# Altium footprint library HSR_BM28B06.PcbLib: 8 footprints
Each footprint in its own frame and in the unit in brackets; x right, y up, seen from the top. Pads: shape width x height; smd on the part's side, far side on the other; paste and mask are expansions set on the pad; w line width, h text height; cw(c..) or ccw(c..) is an arc to the next point about the centre after c.
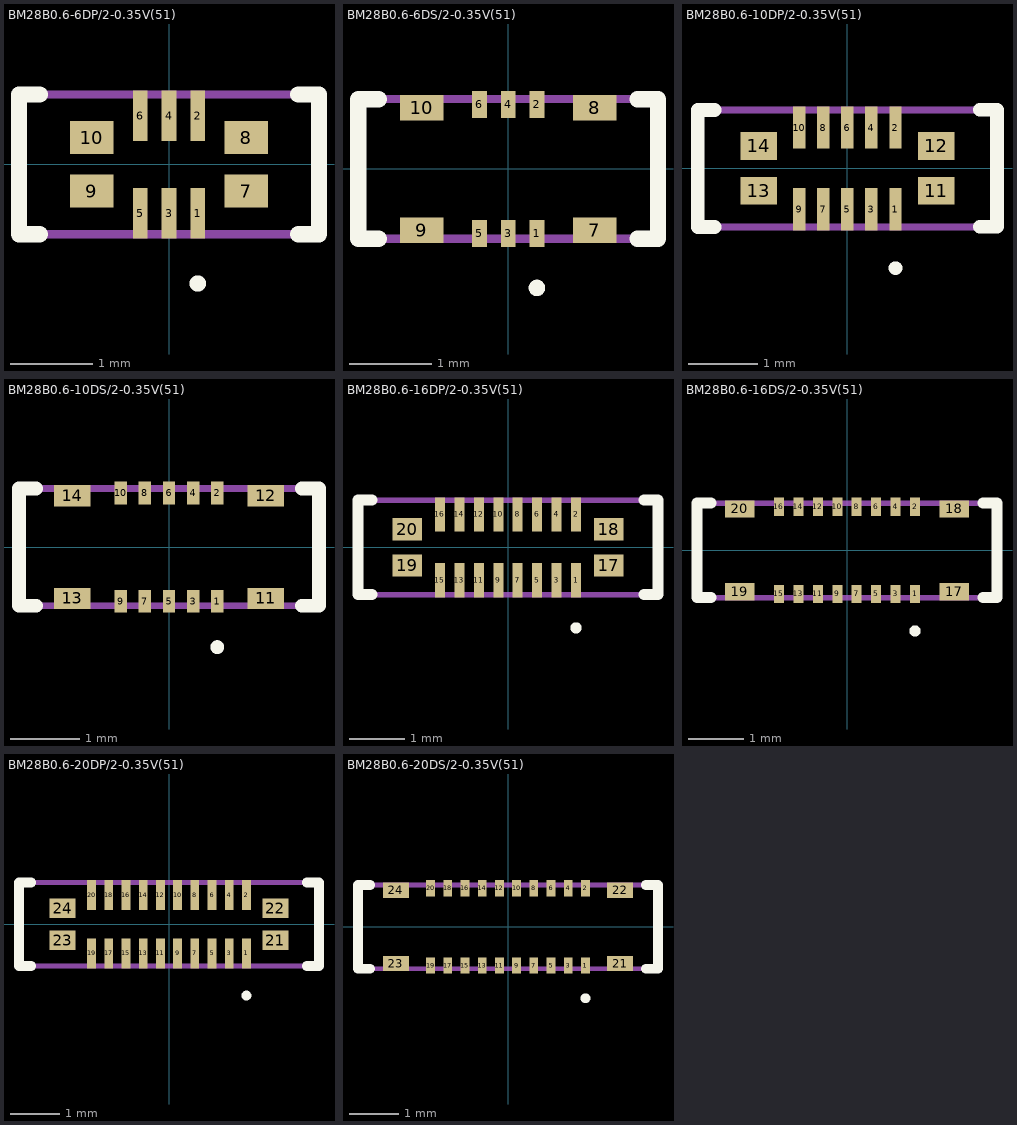
[diagram p0: the footprints below, top view; thin cyan lines are the x and y axes]

## BM28B0.6-6DP/2-0.35V(51) [mm] "BM28B0.6-6DP/2-0.35V(51)"
pads (10):
  rect 0.18x0.615 smd: 1(0.35,-0.593) 2(0.35,0.593) 3(0,-0.593) 4(0,0.593) 5(-0.35,-0.593) 6(-0.35,0.593)
  rect 0.53x0.4 smd: 7(0.94,-0.325) 8(0.94,0.325) 9(-0.94,-0.325) 10(-0.94,0.325)
Top Overlay:
  lines w0.1: 0.35,-1.5 ccw(c0.35,-1.45) 0.35,-1.4 ; 0.35,-1.5 cw(c0.35,-1.45) 0.35,-1.4 ; 0.35,-1.5 ccw(c0.35,-1.45) 0.35,-1.4
  lines w0.2: -1.575,-0.85 -1.825,-0.85 -1.825,0.85 -1.575,0.85 ; 1.575,-0.85 1.825,-0.85 1.825,0.85 1.575,0.85
Top Designator:
  text ".Designator" at -5.998,-0.4 h1.2
Mechanical 15:
  lines w0.1: -1.825,-0.85 -1.825,0.85 1.825,0.85 1.825,-0.85 -1.825,-0.85
3D body "BM28-6DP.stp": height 0.48, standoff 0.01, extent -1.485,-0.75 1.485,0.75

## BM28B0.6-6DS/2-0.35V(51) [mm] "BM28B0.6-6DS/2-0.35V(51)"
pads (10):
  rect 0.18x0.33 smd: 1(0.35,-0.785) 2(0.35,0.785) 3(0,-0.785) 4(0,0.785) 5(-0.35,-0.785) 6(-0.35,0.785)
  rect 0.53x0.31 smd: 7(1.055,-0.745) 8(1.055,0.745) 9(-1.055,-0.745) 10(-1.055,0.745)
Top Overlay:
  lines w0.1: 0.35,-1.5 ccw(c0.35,-1.45) 0.35,-1.4 ; 0.35,-1.5 cw(c0.35,-1.45) 0.35,-1.4 ; 0.35,-1.5 ccw(c0.35,-1.45) 0.35,-1.4
  lines w0.2: -1.575,-0.85 -1.825,-0.85 -1.825,0.85 -1.575,0.85 ; 1.575,-0.85 1.825,-0.85 1.825,0.85 1.575,0.85
Top Designator:
  text ".Designator" at -5.998,-0.4 h1.2
Mechanical 15:
  lines w0.1: -1.829,-0.85 -1.829,0.85 1.825,0.85 1.825,-0.85 -1.829,-0.85
3D body "BM28-6DS.stp": height 0.61, standoff 0.01, extent -1.825,-0.85 1.825,0.85

## BM28B0.6-10DP/2-0.35V(51) [mm] "BM28B0.6-10DP/2-0.35V(51)"
pads (14):
  rect 0.18x0.615 smd: 1(0.7,-0.593) 2(0.7,0.593) 3(0.35,-0.593) 4(0.35,0.593) 5(0,-0.593) 6(0,0.593) 7(-0.35,-0.593) 8(-0.35,0.593) 9(-0.7,-0.593) 10(-0.7,0.593)
  rect 0.53x0.4 smd: 11(1.29,-0.325) 12(1.29,0.325) 13(-1.29,-0.325) 14(-1.29,0.325)
Top Overlay:
  lines w0.1: 0.7,-1.5 ccw(c0.7,-1.45) 0.7,-1.4 ; 0.7,-1.5 cw(c0.7,-1.45) 0.7,-1.4 ; 0.7,-1.5 ccw(c0.7,-1.45) 0.7,-1.4
  lines w0.2: -1.925,-0.85 -2.175,-0.85 -2.175,0.85 -1.925,0.85 ; 1.925,-0.85 2.175,-0.85 2.175,0.85 1.925,0.85
Top Designator:
  text ".Designator" at -5.998,-0.4 h1.2
Mechanical 15:
  lines w0.1: -2.184,-0.85 -2.184,0.85 2.175,0.85 2.175,-0.85 -2.184,-0.85
3D body "BM28-10DP.stp": height 0.46, standoff -0.01, extent -1.835,-0.75 1.835,0.75

## BM28B0.6-10DS/2-0.35V(51) [mm] "BM28B0.6-10DS/2-0.35V(51)"
pads (14):
  rect 0.18x0.33 smd: 1(0.7,-0.785) 2(0.7,0.785) 3(0.35,-0.785) 4(0.35,0.785) 5(0,-0.785) 6(0,0.785) 7(-0.35,-0.785) 8(-0.35,0.785) 9(-0.7,-0.785) 10(-0.7,0.785)
  rect 0.53x0.31 smd: 11(1.405,-0.745) 12(1.405,0.745) 13(-1.405,-0.745) 14(-1.405,0.745)
Top Overlay:
  lines w0.1: 0.7,-1.5 ccw(c0.7,-1.45) 0.7,-1.4 ; 0.7,-1.5 cw(c0.7,-1.45) 0.7,-1.4 ; 0.7,-1.5 ccw(c0.7,-1.45) 0.7,-1.4
  lines w0.2: -1.925,-0.85 -2.175,-0.85 -2.175,0.85 -1.925,0.85 ; 1.925,-0.85 2.175,-0.85 2.175,0.85 1.925,0.85
Top Designator:
  text ".Designator" at -5.998,-0.4 h1.2
Mechanical 15:
  lines w0.1: -2.175,-0.85 2.175,-0.85 2.175,0.85 -2.175,0.85 -2.175,-0.85
3D body "BM28-10DS.stp": height 0.59, standoff -0.01, extent -2.181,-0.844 2.169,0.856

## BM28B0.6-16DP/2-0.35V(51) [mm] "BM28B0.6-16DP/2-0.35V(51)"
pads (20):
  rect 0.18x0.615 smd: 1(1.225,-0.593) 2(1.225,0.593) 3(0.875,-0.593) 4(0.875,0.593) 5(0.525,-0.593) 6(0.525,0.593) 7(0.175,-0.593) 8(0.175,0.593) 9(-0.175,-0.593) 10(-0.175,0.593) 11(-0.525,-0.593) 12(-0.525,0.593) 13(-0.875,-0.593) 14(-0.875,0.593) 15(-1.225,-0.593) 16(-1.225,0.593)
  rect 0.53x0.4 smd: 17(1.815,-0.325) 18(1.815,0.325) 19(-1.815,-0.325) 20(-1.815,0.325)
Top Overlay:
  lines w0.1: 1.225,-1.5 ccw(c1.225,-1.45) 1.225,-1.4 ; 1.225,-1.5 cw(c1.225,-1.45) 1.225,-1.4 ; 1.225,-1.5 ccw(c1.225,-1.45) 1.225,-1.4
  lines w0.2: -2.45,-0.85 -2.7,-0.85 -2.7,0.85 -2.45,0.85 ; 2.45,-0.85 2.7,-0.85 2.7,0.85 2.45,0.85
Top Designator:
  text ".Designator" at -5.998,-0.4 h1.2
Mechanical 15:
  lines w0.1: -2.7,-0.85 2.7,-0.85 2.7,0.85 -2.7,0.85 -2.7,-0.85
3D body "BM28-16DP.stp": height 0.48, standoff 0.01, extent -2.36,-0.75 2.36,0.75

## BM28B0.6-16DS/2-0.35V(51) [mm] "BM28B0.6-16DS/2-0.35V(51)"
pads (20):
  rect 0.18x0.33 smd: 1(1.225,-0.785) 2(1.225,0.785) 3(0.875,-0.785) 4(0.875,0.785) 5(0.525,-0.785) 6(0.525,0.785) 7(0.175,-0.785) 8(0.175,0.785) 9(-0.175,-0.785) 10(-0.175,0.785) 11(-0.525,-0.785) 12(-0.525,0.785) 13(-0.875,-0.785) 14(-0.875,0.785) 15(-1.225,-0.785) 16(-1.225,0.785)
  rect 0.53x0.31 smd: 17(1.93,-0.745) 18(1.93,0.745) 19(-1.93,-0.745) 20(-1.93,0.745)
Top Overlay:
  lines w0.1: 1.225,-1.5 ccw(c1.225,-1.45) 1.225,-1.4 ; 1.225,-1.5 cw(c1.225,-1.45) 1.225,-1.4 ; 1.225,-1.5 ccw(c1.225,-1.45) 1.225,-1.4
  lines w0.2: -2.45,-0.85 -2.7,-0.85 -2.7,0.85 -2.45,0.85 ; 2.45,-0.85 2.7,-0.85 2.7,0.85 2.45,0.85
Top Designator:
  text ".Designator" at -5.998,-0.4 h1.2
Mechanical 15:
  lines w0.1: -2.692,-0.85 2.7,-0.85 2.7,0.85 -2.692,0.85 -2.692,-0.85
3D body "BM28-16DS.stp": height 0.6, standoff 0, extent -2.7,-0.85 2.7,0.85

## BM28B0.6-20DP/2-0.35V(51) [mm] "BM28B0.6-20DP/2-0.35V(51)"
pads (24):
  rect 0.18x0.615 smd: 1(1.575,-0.593) 2(1.575,0.593) 3(1.225,-0.593) 4(1.225,0.593) 5(0.875,-0.593) 6(0.875,0.593) 7(0.525,-0.593) 8(0.525,0.593) 9(0.175,-0.593) 10(0.175,0.593) 11(-0.175,-0.593) 12(-0.175,0.593) 13(-0.525,-0.593) 14(-0.525,0.593) 15(-0.875,-0.593) 16(-0.875,0.593) 17(-1.225,-0.593) 18(-1.225,0.593) 19(-1.575,-0.593) 20(-1.575,0.593)
  rect 0.53x0.4 smd: 21(2.165,-0.325) 22(2.165,0.325) 23(-2.165,-0.325) 24(-2.165,0.325)
Top Overlay:
  lines w0.1: 1.575,-1.5 ccw(c1.575,-1.45) 1.575,-1.4 ; 1.575,-1.5 cw(c1.575,-1.45) 1.575,-1.4 ; 1.575,-1.5 ccw(c1.575,-1.45) 1.575,-1.4
  lines w0.2: -2.8,-0.85 -3.05,-0.85 -3.05,0.85 -2.8,0.85 ; 2.8,-0.85 3.05,-0.85 3.05,0.85 2.8,0.85
Top Designator:
  text ".Designator" at -5.998,-0.4 h1.2
Mechanical 15:
  lines w0.1: -3.05,-0.85 -3.05,0.85 3.05,0.85 3.05,-0.85 -3.05,-0.85
3D body "BM28-20DP.stp": height 0.48, standoff 0.01, extent -2.71,-0.75 2.71,0.75

## BM28B0.6-20DS/2-0.35V(51) [mm] "BM28B0.6-20DS/2-0.35V(51)"
pads (24):
  rect 0.18x0.33 smd: 1(1.575,-0.785) 2(1.575,0.785) 3(1.225,-0.785) 4(1.225,0.785) 5(0.875,-0.785) 6(0.875,0.785) 7(0.525,-0.785) 8(0.525,0.785) 9(0.175,-0.785) 10(0.175,0.785) 11(-0.175,-0.785) 12(-0.175,0.785) 13(-0.525,-0.785) 14(-0.525,0.785) 15(-0.875,-0.785) 16(-0.875,0.785) 17(-1.225,-0.785) 18(-1.225,0.785) 19(-1.575,-0.785) 20(-1.575,0.785)
  rect 0.53x0.31 smd: 21(2.28,-0.745) 22(2.28,0.745) 23(-2.28,-0.745) 24(-2.28,0.745)
Top Overlay:
  lines w0.1: 1.575,-1.5 ccw(c1.575,-1.45) 1.575,-1.4 ; 1.575,-1.5 cw(c1.575,-1.45) 1.575,-1.4 ; 1.575,-1.5 ccw(c1.575,-1.45) 1.575,-1.4
  lines w0.2: -2.8,-0.85 -3.05,-0.85 -3.05,0.85 -2.8,0.85 ; 2.8,-0.85 3.05,-0.85 3.05,0.85 2.8,0.85
Top Designator:
  text ".Designator" at -5.998,-0.4 h1.2
Mechanical 15:
  lines w0.1: -3.05,-0.85 3.05,-0.85 3.05,0.85 -3.05,0.85 -3.05,-0.85
3D body "BM28-20DS.stp": height 0.61, standoff 0.01, extent -3.05,-0.85 3.05,0.85